# Altium integrated library Conector_Potencia.IntLib: 1 symbol
Pins are listed as number, name and electrical type; pins without a type are passive.

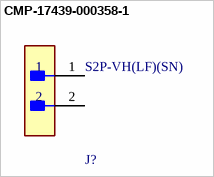
[diagram p0: symbol CMP-17439-000358-1]

## CMP-17439-000358-1
designator J?, comment S2P-VH(LF)(SN)
CONN HEADER R/A 2POS 3.96MM; Max Current Rating: 10A; Max Voltage Rating (AC): 250V; Contact Resistance: 20mR; Number of Positions: 2; Housing Color: White; Packaging: Box; Termination: Solder; Number of Rows: 1; Length: 7.86mm; Orientation: Right Angle; Pitch: 3.96mm; Min Operating Temperature: -25°C; Contact Plating: Copper; Max Operating Temperature: 85°C; Lead Free: Lead Free; Housing Material: Polyamide; Contact Material: Brass
footprint FP-S2P-VH_LF_SN-MFG
pins: 1, 2